# Altium footprint library Visual.PcbLib: 3 footprints
Each footprint in its own frame and in the unit in brackets; x right, y up, seen from the top. Pads: shape width x height; smd on the part's side, far side on the other; paste and mask are expansions set on the pad; w line width, h text height; cw(c..) or ccw(c..) is an arc to the next point about the centre after c.
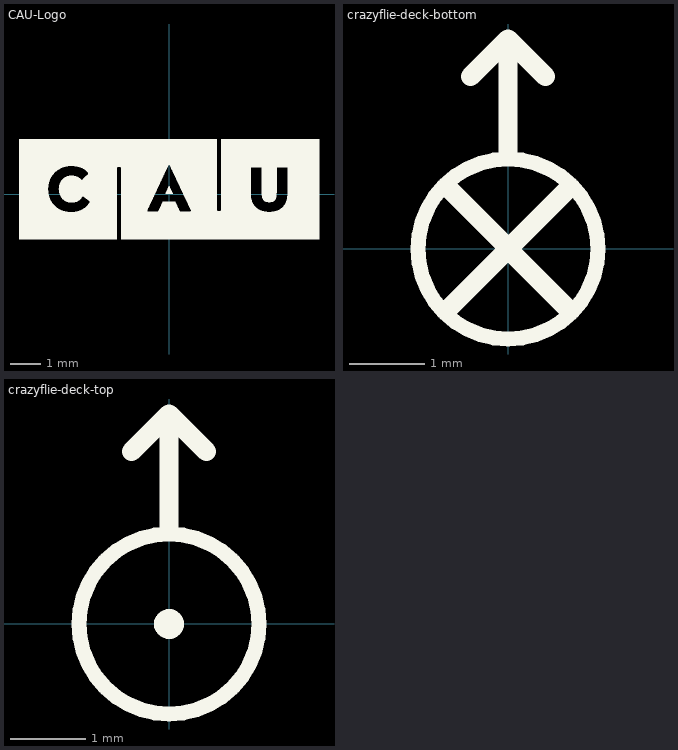
[diagram p0: the footprints below, top view; thin cyan lines are the x and y axes]

## CAU-Logo [mm] "width 1cm"
Top Overlay:
  drawing of 2 lines, arcs and shapes, not listed

## crazyflie-deck-bottom [mm]
Top Overlay:
  circle w0.2: c0,0 r1.2
  lines w0.254: -0.793,-0.794 0.007,0.006 ; -0.787,0.806 0.013,0.006 ; -0.5,2.3 0,2.8 ; 0,1.3 0,2.8 ; 0.5,2.3 0,2.8 ; 0.8,-0.8 0,0 0.8,0.8

## crazyflie-deck-top [mm]
Top Overlay:
  circle w0.2: c0,0 r0.1
  circle w0.2: c0,0 r1.2
  lines w0.254: -0.5,2.3 0,2.8 ; 0,1.3 0,2.8 ; 0.5,2.3 0,2.8